# Altium schematic symbol library 2N7002,215.SchLib: 1 symbol
Pins are listed as number, name and electrical type; pins without a type are passive.

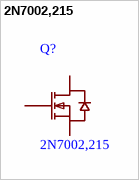
[diagram p0: symbol 2N7002,215]

## 2N7002,215
designator Q?
1个N沟道 耐压:60V 电流:300mA / 数量:1个N沟道 / 漏源电压(Vdss):60V / 连续漏极电流(Id):300mA / 导通电阻(RDS(on)):5Ω@10V / 耗散功率(Pd):830mW / 阈值电压(Vgs(th)):2.5V / 型号:2N7002,215 / LCSC C65189 / 厂牌:Nexperia(安世)
footprint SOT-23_L2.9-W1.3-P1.90-LS2.4-BR (PCB footprint)
pins: 1 G, 2 S, 3 D